# Altium schematic symbol library A3144EUA.SchLib: 1 symbol
Pins are listed as number, name and electrical type; pins without a type are passive.

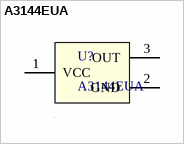
[diagram p0: symbol A3144EUA]

## A3144EUA
designator U?
Digital Switch Unipolar Switch Current Source Hall Effect 3-SIP; Manufacturer Name: Allegro Microsystems; Manufacturer Part Number: A3144EUA
footprint A3144EUA (Digital Switch Unipolar Switch Current Source Hall Effect 3-SIP)
pins: 1 VCC, 2 GND, 3 OUT